# Altium footprint library LimeMicroAltiumLib.PcbLib: 876 footprints (part 34 of 57)
Each footprint in its own frame and in the unit in brackets; x right, y up, seen from the top. Pads: shape width x height; smd on the part's side, far side on the other; paste and mask are expansions set on the pad; w line width, h text height; cw(c..) or ccw(c..) is an arc to the next point about the centre after c.
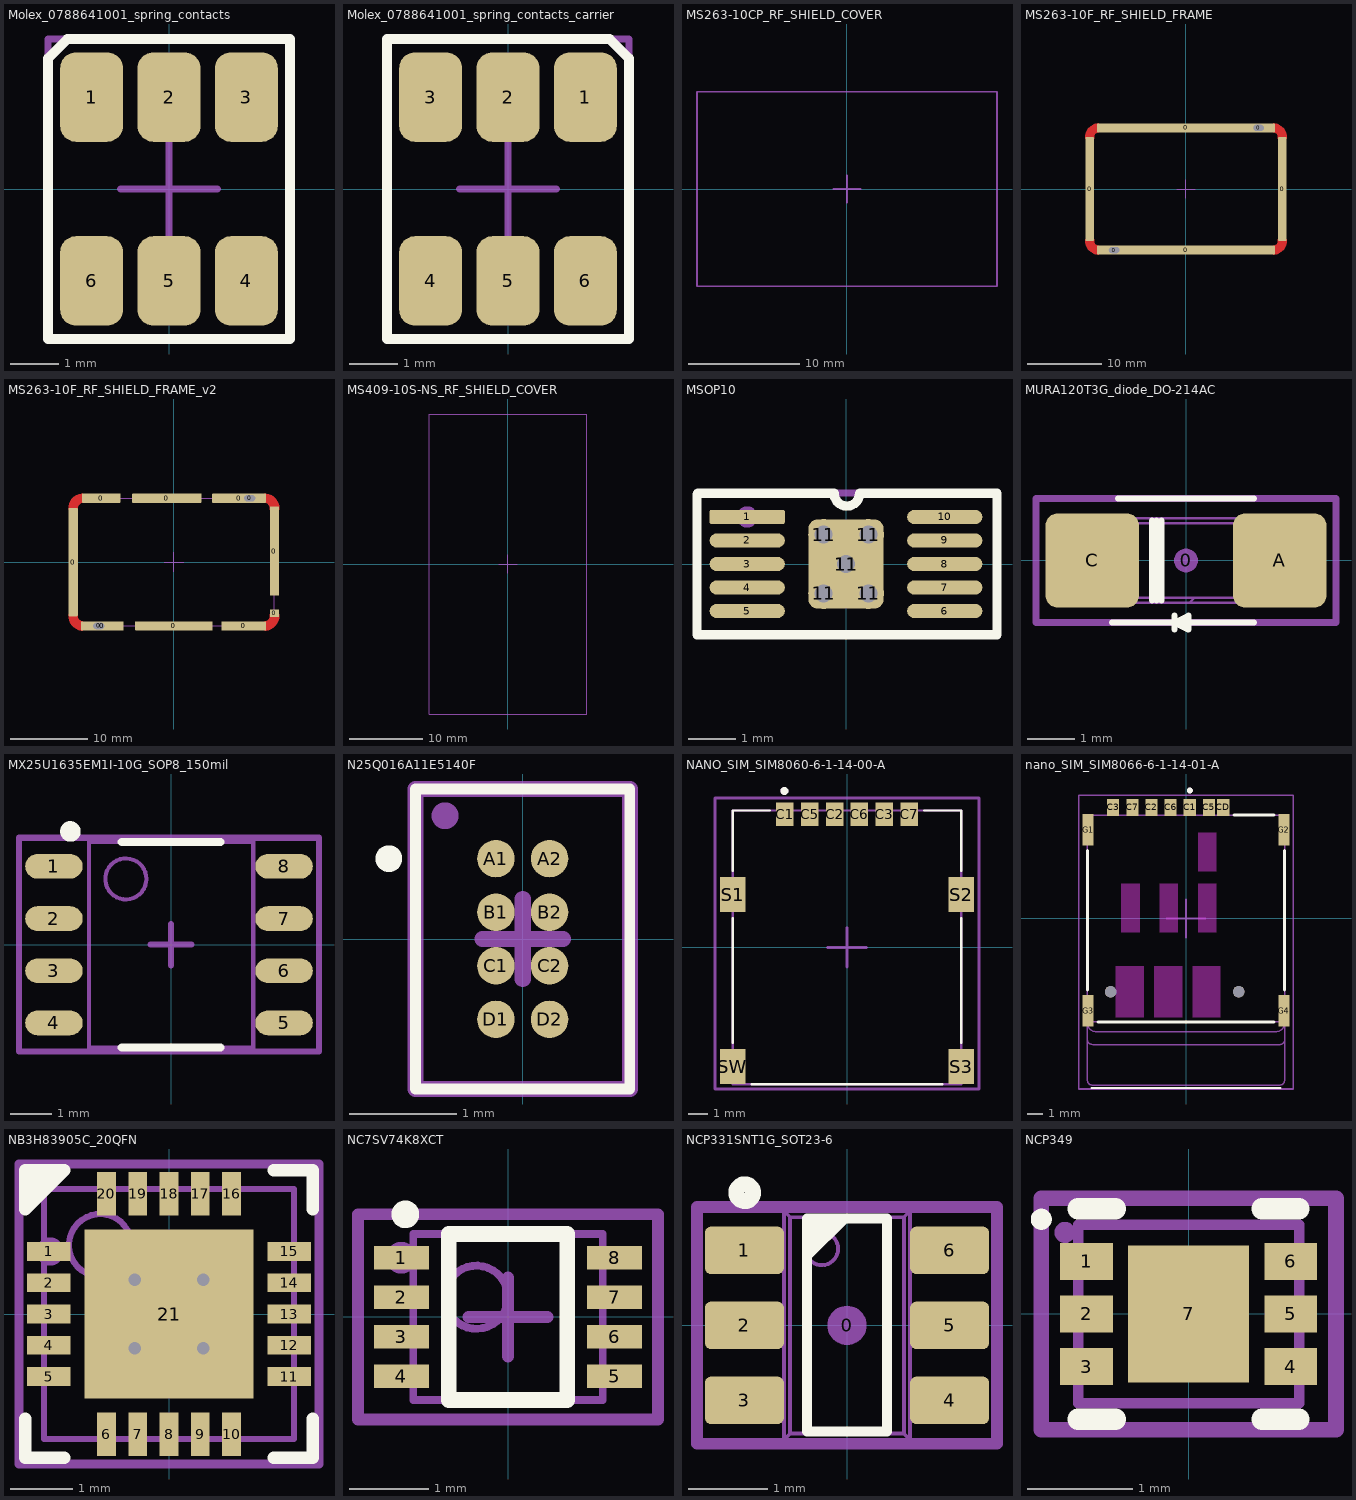
[diagram p33: the footprints below, top view; thin cyan lines are the x and y axes]

## Molex_0788641001_spring_contacts [mm]
pads (6):
  rrect50% 1.3x1.85 smd paste-5: 1(-1.6,1.9) 2(0,1.9) 3(1.6,1.9) 4(1.6,-1.9) 5(0,-1.9) 6(-1.6,-1.9)
Top Overlay:
  lines w0.2: -2.5,-3.1 -2.5,2.7 -2.1,3.1 2.5,3.1 2.5,-3.1 -2.5,-3.1
Mechanical 15:
  circle w0.2: c-1.6,1.9 r0.1
  lines w0.15: -1,0 0,0 ; 0,-1 0,0 ; 0,1 0,0 ; 1,0 0,0 ; -2.5,-3.1 2.5,-3.1 2.5,3.1 -2.5,3.1 -2.5,-3.1
  text ".Designator" at 0,0 h0.55
3D body "788641001.stp": height 2, standoff 0, extent -2.4,-2.475 2.4,2.525

## Molex_0788641001_spring_contacts_carrier [mm] "flipped pinout compared to Molex_0788641001_spring_contacts"
pads (6):
  rrect50% 1.3x1.85 smd paste-5: 1(1.6,1.9) 2(0,1.9) 3(-1.6,1.9) 4(-1.6,-1.9) 5(0,-1.9) 6(1.6,-1.9)
Top Overlay:
  lines w0.2: -2.5,-3.1 -2.5,3.1 2.1,3.1 2.5,2.7 2.5,-3.1 -2.5,-3.1
Mechanical 15:
  circle w0.2: c1.6,1.9 r0.1
  lines w0.15: -1,0 0,0 ; 0,-1 0,0 ; 0,1 0,0 ; 1,0 0,0 ; -2.5,-3.1 2.5,-3.1 2.5,3.1 -2.5,3.1 -2.5,-3.1
  text ".Designator" at 0,0 h0.55
3D body "788641001.stp": height 2, standoff 0, extent -2.4,-2.475 2.4,2.525

## MS263-10CP_RF_SHIELD_COVER [mm] "Full footprint"
Mechanical 15:
  lines w0.15: -1.25,0 0,0 ; 0,-1.25 0,0 ; 0,1.25 0,0 ; 1.25,0 0,0 ; -13.5,-8.75 -13.5,8.75 13.5,8.75 13.5,-8.75 -13.5,-8.75
  text ".Designator" at 0,0 h0.55
3D body "MS263-10CP.step": height 4.8, standoff 0.8, extent -13.45,-8.7 13.45,8.7

## MS263-10F_RF_SHIELD_FRAME [mm] "Full footprint"
pads (6):
  rrect20% 1.2x14 smd mask+0.05: 0(-13,0) 0(13,0)
  oval 2x1 hole 0.8 slot 1.4 at 0 deg mask+0.05: 0(-9.7,-8.25) 0(9.8,8.25)
  rrect20% 24x1.2 smd mask+0.05: 0(0,-8.25) 0(0,8.25)
Top Layer:
  region: -12.4,-6.75 -12.4,-7 -12.387,-7.127 -12.29,-7.361 -12.111,-7.54 -11.877,-7.637 -11.75,-7.65 -11.75,-8.85 -11.932,-8.85 -12.29,-8.779 -12.626,-8.639 -12.929,-8.437 -13.187,-8.179 -13.389,-7.876 -13.529,-7.54 -13.6,-7.182 -13.6,-7 -13.6,-6.75
  region: 12.4,-6.75 12.4,-7 12.387,-7.127 12.29,-7.361 12.111,-7.54 11.877,-7.637 11.75,-7.65 11.75,-8.85 11.932,-8.85 12.29,-8.779 12.626,-8.639 12.929,-8.437 13.187,-8.179 13.389,-7.876 13.529,-7.54 13.6,-7.182 13.6,-7 13.6,-6.75
  region: 12.4,6.75 12.4,7 12.387,7.127 12.29,7.361 12.111,7.54 11.877,7.637 11.75,7.65 11.75,8.85 11.932,8.85 12.29,8.779 12.626,8.639 12.929,8.437 13.187,8.179 13.389,7.876 13.529,7.54 13.6,7.182 13.6,7 13.6,6.75
  region: -12.4,6.75 -12.4,7 -12.387,7.127 -12.29,7.361 -12.111,7.54 -11.877,7.637 -11.75,7.65 -11.75,8.85 -11.932,8.85 -12.29,8.779 -12.626,8.639 -12.929,8.437 -13.187,8.179 -13.389,7.876 -13.529,7.54 -13.6,7.182 -13.6,7 -13.6,6.75
Mechanical 15:
  lines w0.15: -1.25,0 0,0 ; 0,-1.25 0,0 ; 0,1.25 0,0 ; 1.25,0 0,0 ; -13,-8.25 -13,8.25 13,8.25 13,-8.25 -13,-8.25
  text ".Designator" at 0,0 h0.55
3D body "MS263-10F.step": height 4.5, standoff -1.2, extent -13.15,-8.4 13.15,8.4

## MS263-10F_RF_SHIELD_FRAME_v2 [mm] "Full footprint"
pads (11):
  rrect20% 1.2x14 smd mask+0.05: 0(-13,0)
  oval 2x1 hole 0.8 slot 1.4 at 0 deg mask+0.05: 0(-9.7,-8.25) 0(9.8,8.25)
  rrect20% 5x1.2 smd mask+0.05: 0(-9.375,8.25)
  rrect20% 5.5x1.2 smd mask+0.05: 0(-9.225,-8.25)
  rrect20% 9x1.2 smd mask+0.05: 0(-0.9,8.25)
  rrect20% 10x1.2 smd mask+0.05: 0(0,-8.25)
  rrect20% 7x1.2 smd mask+0.05: 0(8.425,8.25)
  rrect20% 5.8x1.2 smd mask+0.05: 0(9.025,-8.25)
  rrect20% 1.2x1 smd mask+0.05: 0(13,-6.625)
  rrect20% 1.2x11.5 smd mask+0.05: 0(13,1.4)
Top Layer:
  region: -12.4,-6.75 -12.4,-7 -12.387,-7.127 -12.29,-7.361 -12.111,-7.54 -11.877,-7.637 -11.75,-7.65 -11.75,-8.85 -11.932,-8.85 -12.29,-8.779 -12.626,-8.639 -12.929,-8.437 -13.187,-8.179 -13.389,-7.876 -13.529,-7.54 -13.6,-7.182 -13.6,-7 -13.6,-6.75
  region: 12.4,-6.75 12.4,-7 12.387,-7.127 12.29,-7.361 12.111,-7.54 11.877,-7.637 11.75,-7.65 11.75,-8.85 11.932,-8.85 12.29,-8.779 12.626,-8.639 12.929,-8.437 13.187,-8.179 13.389,-7.876 13.529,-7.54 13.6,-7.182 13.6,-7 13.6,-6.75
  region: 12.4,6.75 12.4,7 12.387,7.127 12.29,7.361 12.111,7.54 11.877,7.637 11.75,7.65 11.75,8.85 11.932,8.85 12.29,8.779 12.626,8.639 12.929,8.437 13.187,8.179 13.389,7.876 13.529,7.54 13.6,7.182 13.6,7 13.6,6.75
  region: -12.4,6.75 -12.4,7 -12.387,7.127 -12.29,7.361 -12.111,7.54 -11.877,7.637 -11.75,7.65 -11.75,8.85 -11.932,8.85 -12.29,8.779 -12.626,8.639 -12.929,8.437 -13.187,8.179 -13.389,7.876 -13.529,7.54 -13.6,7.182 -13.6,7 -13.6,6.75
Mechanical 15:
  lines w0.15: -1.25,0 0,0 ; 0,-1.25 0,0 ; 0,1.25 0,0 ; 1.25,0 0,0 ; -13,-8.25 -13,8.25 13,8.25 13,-8.25 -13,-8.25
  text ".Designator" at 0,0 h0.55
3D body "MS263-10F.step": height 4.5, standoff -1.2, extent -13.15,-8.4 13.15,8.4

## MS409-10S-NS_RF_SHIELD_COVER [mm]
Mechanical 15:
  lines w0.15: -1.25,0 0,0 ; 0,-1.25 0,0 ; 0,1.25 0,0 ; 1.25,0 0,0 ; -10.75,-20.45 -10.75,20.45 10.75,20.45 10.75,-20.45 -10.75,-20.45
  text ".Designator" at 0,0 h0.55
  text "Shield Cover" at -2.1,-20 h0.55
3D body "MS409-10S-NS.step": height 2.6, standoff 0.1, extent -10.75,-20.45 10.75,20.45

## MSOP10 [mm]
pads (16):
  rrect25% 1.6x0.3 smd mask+0.05: 1(-2.1,1)
  oval 1.6x0.3 smd mask+0.05: 2(-2.1,0.5) 3(-2.1,0) 4(-2.1,-0.5) 5(-2.1,-1) 6(2.1,-1) 7(2.1,-0.5) 8(2.1,0) 9(2.1,0.5) 10(2.1,1)
  round 0.66 hole 0.381: 11(-0.475,-0.625) 11(-0.475,0.625) 11(0,0) 11(0.475,-0.625) 11(0.475,0.625)
  rrect25% 1.6x1.9 smd: 11(0,0)
Top Overlay:
  lines w0.2: -0.275,1.5 -3.149,1.5 -3.167,1.483 -3.167,-1.5 3.209,-1.5 3.209,1.5 0.3,1.5 ; -0.25,1.5 ccw(c0.019,1.5) 0.289,1.5
Top Solder:
  rectangle: -0.925,-1.075 0.925,1.075
Mechanical 15:
  circle w0.25: c-2.1,1 r0.1
  lines w0.15: -0.525,0 0,0 ; 0,-0.525 0,0 ; 0.525,0 0,0 ; 0,0 0,0.525 ; 0,0.525 0,0.525 ; -3.167,-1.489 -3.167,1.508 3.209,1.508 3.209,-1.489 -3.167,-1.489
  text ".Designator" at -0.15,-0.325 h0.55
3D body "User Library-MSOP10-1.step": height 1.09, standoff 0, extent -2.575,-1.6 2.575,1.6

## MURA120T3G_diode_DO-214AC [mm]
height 1.15
pads (3):
  round 0.508 on Mech15: 0(0,0)
  rrect25% 2x2 smd: A(2,0) C(-2,0)
Top Overlay:
  lines w0.127: -1.575,-1.325 1.448,-1.325 ; -1.45,1.325 1.45,1.325 ; -0.725,-0.85 -0.725,0.85 ; -0.625,-0.85 -0.625,0.85 ; -0.525,-0.85 -0.525,0.85 ; -0.25,-1.475 -0.25,-1.175 ; 0.05,-1.325 -0.25,-1.325 ; -0.25,-1.325 0.05,-1.475 0.05,-1.175 -0.25,-1.325
Mechanical 13:
  lines w0.05: -1.766,-0.308 -1.766,0.308 ; -1.707,-0.308 -1.707,0.308 ; -1.517,-0.308 -1.517,0.308 ; -1.425,-0.308 -1.95,-0.308 -1.95,0.308 -1.425,0.308 ; 0.075,-0.9 0.177,-0.798 ; 1.425,-0.308 1.95,-0.308 1.95,0.308 1.425,0.308 ; 1.517,-0.308 1.517,0.308 ; 1.707,-0.308 1.707,0.308 ; 1.766,-0.308 1.766,0.308 ; -1.425,0.9 -1.323,0.798 ; -1.425,0.9 1.425,0.9 ; -1.425,0.9 -1.425,-0.9 1.425,-0.9 ; -1.323,0.798 -1.072,0.798 ; -1.323,0.798 -1.323,-0.798 -1.072,-0.798 ; -1.072,-0.798 1.322,-0.797 ; -1.072,-0.798 -1.072,0.798 ; -1.072,0.798 1.322,0.797 ; 1.322,-0.797 1.322,0.797 ; 1.322,-0.797 1.425,-0.9 ; 1.322,0.797 1.425,0.9 ; 1.425,-0.9 1.425,0.9
Mechanical 15:
  lines w0.15: -3.2,-1.325 3.2,-1.325 3.2,1.325 -3.2,1.325 -3.2,-1.325
  text "A" at 1.475,-0.275 h0.55
  text "C" at -1.9,-0.275 h0.55
  text ".Designator" at 0,0 h0.55
3D body "User Library-DO-214AC SMA.SLDPRT": height 2.4, standoff 0, extent -2.6,-1.3 2.6,1.3

## MX25U1635EM1I-10G_SOP8_150mil [mm] "8-Pin Small Outline Integrated Circuit 1.27 mm Pitch"
height 1.55
pads (8):
  oval 1.4x0.6 smd: 1(-2.85,1.905) 2(-2.85,0.635) 3(-2.85,-0.635) 4(-2.85,-1.905) 5(2.75,-1.905) 6(2.75,-0.635) 7(2.75,0.635) 8(2.75,1.905)
Top Overlay:
  circle w0.25: c-2.45,2.755 r0.125
  lines w0.2: -1.2,-2.5 1.2,-2.5 ; -1.2,2.5 1.2,2.5
Mechanical 13:
  circle w0.1: c-1.1,1.6 r0.5
  lines w0.1: -2,-2.5 2,-2.5 2,2.5 -2,2.5 -2,-2.5
Mechanical 15:
  circle w0.35: c-3.1,1.9 r0.1
  lines w0.15: -0.5,0 0.5,0 ; 0,-0.5 0,0.5 ; -3.7,-2.6 3.6,-2.6 3.6,2.6 -3.7,2.6 -3.7,-2.6
  text ".Designator" at 0,0 h0.55
3D body "SOIC-8.STEP": height 1.75, standoff 0, extent -3,-2.45 3,2.45

## N25Q016A11E5140F [mm] "2.8 x 2 16 MB memory"
height 0.41
pads (8):
  round 0.35 smd mask+0.03: A1(-0.25,0.75) A2(0.25,0.75) B1(-0.25,0.25) B2(0.25,0.25) C1(-0.25,-0.25) C2(0.25,-0.25) D1(-0.25,-0.75) D2(0.25,-0.75)
Top Overlay:
  circle w0.2: c-1.25,0.75 r0.025
  lines w0.1: -1,-1.4 -1,1.4 1,1.4 1,-1.4 -1,-1.4
Mechanical 15:
  circle w0.2: c-0.725,1.15 r0.025
  lines w0.15: -0.375,0 0,0 ; 0,-0.375 0,0 ; 0,0.375 0,0 ; 0.375,0 0,0 ; -1,-1.4 -1,1.4 1,1.4 1,-1.4 -1,-1.4
  text "A1" at -0.4,0.625 h0.3
  text ".Designator" at 0,0 h0.55
3D body: height 0.42, standoff 0.41, extent -0.675,0.675 -0.275,1.075
3D body: height 0.41, standoff 0, extent -1,-1.4 1,1.4

## NANO_SIM_SIM8060-6-1-14-00-A [mm]
pads (10):
  rect 0.9x1.2 smd: C1(-3.175,6.8) C2(-0.635,6.8) C3(1.905,6.8) C5(-1.905,6.8) C6(0.635,6.8) C7(3.175,6.8)
  rect 1.3x1.8 smd: S1(-5.85,2.7) S2(5.85,2.7) S3(5.85,-6.1) SW(-5.85,-6.1)
Top Overlay:
  circle w0.2: c-3.2,8 r0.1
  lines w0.127: -5.85,-4.88 -5.85,1.48 ; -5.85,3.92 -5.85,7 -3.945,7 ; -4.88,-7 4.88,-7 ; 3.945,7 5.85,7 5.85,3.92 ; 5.85,-4.88 5.85,1.48
Mechanical 13:
  circle w0.2: c-3.2,8 r0.1
  lines w0.127: -5.85,-7 5.85,-7 5.85,7 -5.85,7 -5.85,-7
Mechanical 15:
  lines w0.15: -1,0 0,0 ; 0,-1 0,0 ; 0,1 0,0 ; 1,0 0,0 ; -6.75,-7.25 -6.75,7.65 6.75,7.65 6.75,-7.25 -6.75,-7.25
  text "C7" at 2.9,5.9 h0.55
  text "C3" at 1.5,5.9 h0.55
  text "C6" at 0.3,5.9 h0.55
  text "C2" at -0.9,5.9 h0.55
  text "C5" at -2.3,5.9 h0.55
  text "C1" at -3.5,5.9 h0.55
  text ".Designator" at 0,0 h0.55
3D body "User Library-SIM8060.step": height 1.4, standoff -0.05, extent -6.2,-7 6.2,7

## nano_SIM_SIM8066-6-1-14-01-A [mm]
pads (13):
  rect 0.8x1.14 smd mask+0.05: C1(0.25,7.37) C2(-2.29,7.37) C3(-4.83,7.37) C6(-1.02,7.37) C7(-3.56,7.37)
  rect 0.8x1.14 smd mask+0.1: C5(1.52,7.37) CD(2.47,7.37)
  rect 0.7x2.1 smd: G1(-6.5,5.89) G2(6.5,5.89) G3(-6.5,-6.11) G4(6.5,-6.11)
  round 0.75 hole 0.75 unplated: ""(-5,-4.86) ""(3.5,-4.86)
Top Layer keep-out:
  region: 2,3.135 0.8,3.135 0.8,5.685 2,5.685
  region: -3.08,-0.915 -4.28,-0.915 -4.28,2.295 -3.08,2.295
  region: -0.54,-0.915 -1.74,-0.915 -1.74,2.295 -0.54,2.295
  region: 2,-0.915 0.8,-0.915 0.8,2.295 2,2.295
  region: 2.285,-6.56 0.435,-6.56 0.435,-3.16 2.285,-3.16
  region: -0.255,-6.56 -2.105,-6.56 -2.105,-3.16 -0.255,-3.16
  region: -2.795,-6.56 -4.645,-6.56 -4.645,-3.16 -2.795,-3.16
Top Overlay:
  circle w0.2: c0.25,8.49 r0.1
  lines w0.15: -6.25,-11.25 6.25,-11.25
  lines w0.2: -6.545,-4.74 -6.545,4.52 ; -5.83,-6.86 5.83,-6.86 ; 3.19,6.86 5.83,6.86 ; 6.545,-4.74 6.545,4.52
Mechanical 13:
  circle w0.2: c0.25,8.49 r0.1
  lines w0.1: -6.545,-10.713 ccw(c-6.198,-10.713) -6.198,-11.06 ; -6.545,-10.71 -6.545,-8.01 -6.545,-6.86 ; -6.545,-8.013 ccw(c-6.198,-8.013) -6.198,-8.36 ; -6.2,-11.06 6.2,-11.06 ; -6.2,-8.36 6.2,-8.36 ccw(c6.222,-8.037) 6.545,-8.06 ; 6.198,-11.06 ccw(c6.198,-10.713) 6.545,-10.713 ; 6.545,-10.71 6.545,-8.06 ; -6.545,-6.86 ccw(c-5.947,-6.913) -6,-7.51 6,-7.51 ccw(c5.947,-6.913) 6.545,-6.86 ; -6.545,-6.86 -6.545,6.86 6.545,6.86 6.545,-6.86 ; -6.545,-6.86 6.545,-6.86 ; 6.545,-8.06 6.545,-6.86
Mechanical 15:
  lines w0.1: -7.1,-11.31 -7.1,8.19 7.1,8.19 7.1,-11.31 -7.1,-11.31
  lines w0.15: -1.25,0 0,0 ; 0,-1.25 0,0 ; 0,1.25 0,0 ; 1.25,0 0,0
  text "CD" at 2.5,5.75 h0.55
  text "C5" at 1,5.75 h0.55
  text "C1" at 0,5.75 h0.55
  text "C6" at -1.5,5.75 h0.55
  text "C2" at -2.75,5.75 h0.55
  text "C7" at -4,5.75 h0.55
  text "C3" at -5.25,5.75 h0.55
  text ".Designator" at 0,0 h0.55
3D body "SIM8066-6-1-14-01-A--3DModel-STEP-56544.STEP": height 1.44, standoff -0.37, extent -6.545,-7.19 6.545,7.39

## NB3H83905C_20QFN [mm] "QFN, 20-Leads, Body 4,00x4,00mm, Pitch 0,50mm, Thermal Pad 2,70x2,70mm, IPC Medium Density"
height 0.8
pads (21):
  rect 0.7x0.3 smd mask+0.05: 1(-1.925,1) 2(-1.925,0.5) 3(-1.925,0) 4(-1.925,-0.5) 5(-1.925,-1) 11(1.925,-1) 12(1.925,-0.5) 13(1.925,0) 14(1.925,0.5) 15(1.925,1)
  rect 0.3x0.7 smd mask+0.05: 6(-1,-1.925) 7(-0.5,-1.925) 8(0,-1.925) 9(0.5,-1.925) 10(1,-1.925) 16(1,1.925) 17(0.5,1.925) 18(0,1.925) 19(-0.5,1.925) 20(-1,1.925)
  rect 2.7x2.7 smd mask+0.05: 21(0,0)
via 0.55,-0.55 diameter 0.4 hole 0.2
via -0.55,-0.55 diameter 0.4 hole 0.2
via 0.55,0.55 diameter 0.4 hole 0.2
via -0.55,0.55 diameter 0.4 hole 0.2
Top Overlay:
  region: -2.3,1.675 -2.3,2.3 -1.675,2.3
  lines w0.2: -2.3,-1.675 -2.3,-2.3 -1.675,-2.3 ; 1.675,-2.3 2.3,-2.3 2.3,-1.675 ; 1.675,2.3 2.3,2.3 2.3,1.675 ; -2.3,1.675 -2.3,2.3 -1.675,2.3 -2.3,1.675
Mechanical 13:
  circle w0.1: c-1.1,1.1 r0.5
  lines w0.1: -2,-2 2,-2 2,2 -2,2 -2,-2
Mechanical 15:
  circle w0.25: c-1.9,1 r0.1
  lines w0.15: -0.5,0 0.5,0 ; 0,-0.5 0,0.5 ; -2.4,-2.4 2.4,-2.4 2.4,2.4 -2.4,2.4 -2.4,-2.4
  text ".Designator" at 0,0 h0.55
3D body "User Library-QFN24-0_5.STEP": height 1, standoff 0, extent -2,-2 2,2

## NC7SV74K8XCT [mm] "SOIC, 8-Leads, Body 2,00x2,30mm, Pitch 1,27mm, IPC Medium Density"
height 0.9
pads (8):
  rect 0.7x0.3 smd mask+0.05: 1(-1.35,0.75) 2(-1.35,0.25) 3(-1.35,-0.25) 4(-1.35,-0.75) 5(1.35,-0.75) 6(1.35,-0.25) 7(1.35,0.25) 8(1.35,0.75)
Top Overlay:
  circle w0.2: c-1.3,1.3 r0.075
  lines w0.2: -0.75,-1.05 0.75,-1.05 0.75,1.05 -0.75,1.05 -0.75,-1.05
Mechanical 13:
  circle w0.1: c-0.4,0.25 r0.4
  lines w0.1: -1.2,-1.05 1.2,-1.05 1.2,1.05 -1.2,1.05 -1.2,-1.05
Mechanical 15:
  circle w0.25: c-1.35,0.75 r0.075
  lines w0.15: -0.5,0 0.5,0 ; 0,-0.5 0,0.5 ; -1.9,-1.3 1.9,-1.3 1.9,1.3 -1.9,1.3 -1.9,-1.3
  text ".Designator" at 0,0.025 h0.55
3D body "User Library-TSSOP8-2.step": height 0.73, standoff -0.02, extent -1.55,-1 1.55,1

## NCP331SNT1G_SOT23-6 [mm]
height 1.6
pads (7):
  round 0.5 on Mech15: 0(0,0)
  rrect25% 1x0.6 smd: 1(-1.3,0.95) 2(-1.3,0) 3(-1.3,-0.95) 4(1.3,-0.95) 5(1.3,0) 6(1.3,0.95)
Top Overlay:
  circle w0.2: c-1.295,1.68 r0.107
  region: -0.508,1.353 0.053,1.353 -0.508,0.792
  lines w0.127: -0.508,-1.347 -0.508,1.353 0.508,1.353 0.508,-1.347 -0.508,-1.347
Mechanical 13:
  circle w0.05: c-0.32,0.97 r0.208
  lines w0.05: -1.191,-1.15 -1.191,-0.75 ; -1.191,-0.2 -1.191,0.2 ; -1.191,0.75 -1.191,1.15 ; -1.1,-1.15 -1.1,-0.75 ; -1.1,-0.2 -1.1,0.2 ; -1.1,0.75 -1.1,1.15 ; -1.094,-1.15 -1.094,-0.75 ; -1.094,-0.2 -1.094,0.2 ; -1.094,0.75 -1.094,1.15 ; -0.844,-1.15 -0.844,-0.75 ; -0.844,-0.2 -0.844,0.2 ; -0.844,0.75 -0.844,1.15 ; -0.8,-1.15 -1.4,-1.15 -1.4,-0.75 -0.8,-0.75 ; -0.8,-0.2 -1.4,-0.2 -1.4,0.2 -0.8,0.2 ; -0.8,0.75 -1.4,0.75 -1.4,1.15 -0.8,1.15 ; 0.8,-1.15 1.4,-1.15 1.4,-0.75 0.8,-0.75 ; 0.8,-0.2 1.4,-0.2 1.4,0.2 0.8,0.2 ; 0.8,0.75 1.4,0.75 1.4,1.15 0.8,1.15 ; 0.844,-1.15 0.844,-0.75 ; 0.844,-0.2 0.844,0.2 ; 0.844,0.75 0.844,1.15 ; 1.094,-1.15 1.094,-0.75 ; 1.094,-0.2 1.094,0.2 ; 1.094,0.75 1.094,1.15 ; 1.1,-1.15 1.1,-0.75 ; 1.1,-0.2 1.1,0.2 ; 1.1,0.75 1.1,1.15 ; 1.191,-1.15 1.191,-0.75 ; 1.191,-0.2 1.191,0.2 ; 1.191,0.75 1.191,1.15 ; -0.8,-1.45 0.8,-1.45 ; -0.8,-1.45 -0.719,-1.369 ; -0.8,-1.45 -0.8,1.45 ; -0.8,1.45 0.8,1.45 ; -0.8,1.45 -0.719,1.369 ; -0.719,-1.369 -0.719,1.369 ; -0.719,-1.369 0.719,-1.369 ; -0.719,1.369 0.719,1.369 ; 0.719,-1.369 0.719,1.369 ; 0.719,-1.369 0.8,-1.45 ; 0.719,1.369 0.8,1.45 ; 0.8,-1.45 0.8,1.45
Mechanical 15:
  circle w0.15: c-1.325,0.95 r0.071
  lines w0.15: -1.9,-1.5 -1.9,1.5 1.9,1.5 1.9,-1.5 -1.9,-1.5
  text ".Designator" at 0,0 h0.55
3D body "SOT23-6.STEP": height 1.44, standoff -0.01, extent -1.4,-1.45 1.4,1.45

## NCP349 [mm] "SON, 6-Leads, Body 1,60x2,00mm, Pitch 0,50mm, Thermal Pad 1,20x0,79mm, IPC Medium Density"
height 1
pads (7):
  rect 0.5x0.35 smd mask+0.05: 1(-0.97,0.5) 2(-0.97,0) 3(-0.97,-0.5) 4(0.97,-0.5) 5(0.97,0) 6(0.97,0.5)
  rect 1.15x1.3 smd mask+0.05: 7(0,0)
Top Overlay:
  circle w0.1: c-1.4,0.9 r0.05
  lines w0.2: -1.05,-1 -0.695,-1 ; -1.05,1 -0.695,1 ; 0.695,-1 1.05,-1 ; 0.695,1 1.05,1
Top Solder:
  region: -1.275,-0.725 1.275,-0.725 1.275,0.725 -1.275,0.725
Mechanical 13:
  lines w0.1: -1.05,-0.85 -1.05,0.85 1.05,0.85 1.05,-0.85 -1.05,-0.85
Mechanical 15:
  circle w0.1: c-1.175,0.775 r0.05
  lines w0.15: -0.5,0 0.5,0 ; 0,-0.5 0,0.5 ; -1.4,-1.1 -1.4,1.1 1.4,1.1 1.4,-1.1 -1.4,-1.1
  text ".Designator" at 0,0 h0.55
3D body "User Library-LT3008 DFN6.step": height 0.75, standoff -0.01, extent -1.001,-1 1.001,1